# Altium footprint library PcbLib1.PcbLib: 37 footprints (part 1 of 3)
Each footprint in its own frame and in the unit in brackets; x right, y up, seen from the top. Pads: shape width x height; smd on the part's side, far side on the other; paste and mask are expansions set on the pad; w line width, h text height; cw(c..) or ccw(c..) is an arc to the next point about the centre after c.
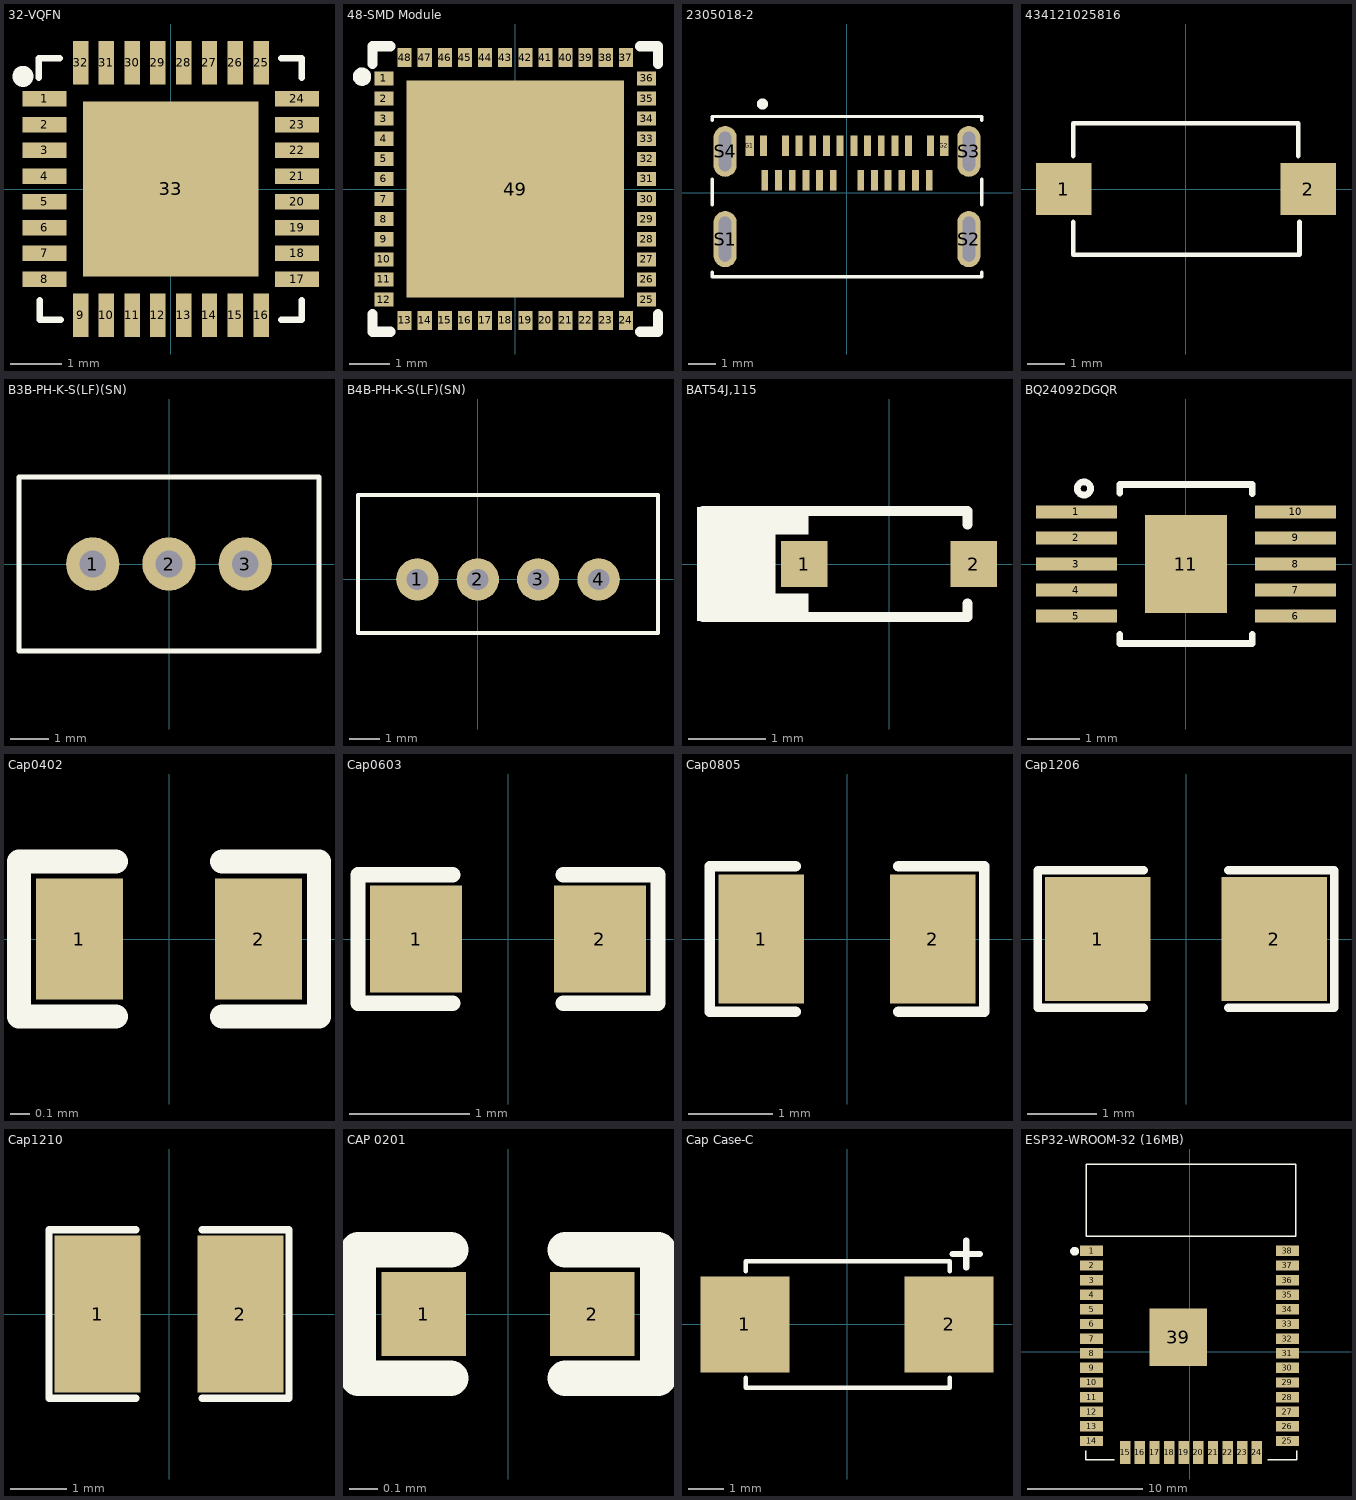
[diagram p0: the footprints below, top view; thin cyan lines are the x and y axes]

## 32-VQFN [mm] "IC MCU 8BIT 32KB FLASH 32VFQFN"
pads (33):
  rect 0.85x0.3 smd: 1(-2.45,1.75) 2(-2.45,1.25) 3(-2.45,0.75) 4(-2.45,0.25) 5(-2.45,-0.25) 6(-2.45,-0.75) 7(-2.45,-1.25) 8(-2.45,-1.75) 17(2.45,-1.75) 18(2.45,-1.25) 19(2.45,-0.75) 20(2.45,-0.25) 21(2.45,0.25) 22(2.45,0.75) 23(2.45,1.25) 24(2.45,1.75)
  rect 0.3x0.85 smd: 9(-1.75,-2.45) 10(-1.25,-2.45) 11(-0.75,-2.45) 12(-0.25,-2.45) 13(0.25,-2.45) 14(0.75,-2.45) 15(1.25,-2.45) 16(1.75,-2.45) 25(1.75,2.45) 26(1.25,2.45) 27(0.75,2.45) 28(0.25,2.45) 29(-0.25,2.45) 30(-0.75,2.45) 31(-1.25,2.45) 32(-1.75,2.45)
  rect 3.4x3.4 smd: 33(0,0)
Top Overlay:
  circle w0.254: c-2.87,2.184 r0.076
  lines w0.127: -2.561,2.159 -2.561,2.54 -2.159,2.54 ; -2.54,-2.159 -2.54,-2.54 -2.138,-2.54 ; 2.138,-2.54 2.54,-2.54 2.54,-2.159 ; 2.138,2.54 2.54,2.54 2.54,2.159
3D body "32M1-A_MCH.step": height 1.4, standoff 0, extent -2.55,-2.55 2.55,2.55

## 48-SMD Module [mm]
pads (49):
  rect 0.47x0.35 smd: 1(-3.265,2.75) 2(-3.265,2.25) 3(-3.265,1.75) 4(-3.265,1.25) 5(-3.265,0.75) 6(-3.265,0.25) 7(-3.265,-0.25) 8(-3.265,-0.75) 9(-3.265,-1.25) 10(-3.265,-1.75) 11(-3.265,-2.25) 12(-3.265,-2.75) 25(3.265,-2.75) 26(3.265,-2.25) 27(3.265,-1.75) 28(3.265,-1.25) 29(3.265,-0.75) 30(3.265,-0.25) 31(3.265,0.25) 32(3.265,0.75) 33(3.265,1.25) 34(3.265,1.75) 35(3.265,2.25) 36(3.265,2.75)
  rect 0.35x0.47 smd: 13(-2.75,-3.265) 14(-2.25,-3.265) 15(-1.75,-3.265) 16(-1.25,-3.265) 17(-0.75,-3.265) 18(-0.25,-3.265) 19(0.25,-3.265) 20(0.75,-3.265) 21(1.25,-3.265) 22(1.75,-3.265) 23(2.25,-3.265) 24(2.75,-3.265) 37(2.75,3.265) 38(2.25,3.265) 39(1.75,3.265) 40(1.25,3.265) 41(0.75,3.265) 42(0.25,3.265) 43(-0.25,3.265) 44(-0.75,3.265) 45(-1.25,3.265) 46(-1.75,3.265) 47(-2.25,3.265) 48(-2.75,3.265)
  rect 5.4x5.4 smd paste-4: 49(0,0)
Top Overlay:
  circle w0.254: c-3.81,2.794 r0.1
  lines w0.254: -3.55,-3.11 -3.55,-3.55 -3.11,-3.55 ; -3.55,3.11 -3.55,3.55 -3.11,3.55 ; 3.11,-3.55 3.55,-3.55 3.55,-3.11 ; 3.11,3.55 3.55,3.55 3.55,3.11
3D body "ESP32-PICO-D4--3DModel-STEP-56544.STEP": height 1.04, standoff 0, extent -3.5,-3.5 3.5,3.5

## 2305018-2 [mm] "CONN RCP USB3.1 TYPEC 24P SMD RA"
pads (30):
  rect 0.25x0.75 smd: A1(-3.05,1.7) A2(-2.25,1.7) A3(-1.75,1.7) A4(-1.25,1.7) A5(-0.75,1.7) A6(-0.25,1.7) A7(0.25,1.7) A8(0.75,1.7) A9(1.25,1.7) A10(1.75,1.7) A11(2.25,1.7) A12(3.05,1.7) B1(3,0.45) B2(2.5,0.45) B3(2,0.45) B4(1.5,0.45) B5(1,0.45) B6(0.5,0.45) B7(-0.5,0.45) B8(-1,0.45) B9(-1.5,0.45) B10(-2,0.45) B11(-2.5,0.45) B12(-3,0.45)
  rect 0.3x0.75 smd: G1(-3.55,1.7) G2(3.55,1.7)
  oval 0.85x2.05 hole 0.45 slot 1.65 at 90 deg: S1(-4.45,-1.7) S2(4.45,-1.7)
  oval 0.85x1.85 hole 0.45 slot 1.45 at 90 deg: S3(4.45,1.5) S4(-4.45,1.5)
Top Overlay:
  circle w0.2: c-3.085,3.232 r0.1
  lines w0.127: -4.925,-2.906 -4.925,-3.075 4.925,-3.075 4.925,-2.906 ; -4.925,-0.444 -4.925,0.48 ; -4.925,2.634 -4.925,2.775 4.925,2.775 4.925,2.634 ; 4.925,-0.444 4.925,0.48
Mechanical 13:
  lines w0.127: -4.925,2.775 4.925,2.775
3D body "2305018-2--3DModel-STEP-56544.STEP": height 3.53, standoff -0.53, extent -4.919,-5.856 4.919,2.794

## 434121025816 [mm] "SWITCH TACTILE SPST-NO 0.05A 12V"
pads (2):
  rect 1.5x1.4 smd: 1(-3.3,0) 2(3.3,0)
Top Overlay:
  lines w0.127: -3.048,-0.889 -3.048,-1.778 3.066,-1.778 3.066,-0.889 ; -3.048,0.889 -3.048,1.778 3.033,1.778 3.033,0.889
3D body "434121025816_Download_STP_434121025816_rev1.stp": height 2.5, standoff 0, extent -3.65,-1.95 3.65,1.95

## B3B-PH-K-S(LF)(SN) [mm] "CONN HEADER VERT 3POS 2MM"
pads (3):
  round 1.4 hole 0.7: 1(-2,0) 2(0,0) 3(2,0)
Top Overlay:
  lines w0.127: -3.937,-2.286 3.937,-2.286 3.937,2.286 -3.937,2.286 -3.937,-2.286
3D body "User Library-B3B-PH-K-S(LF)(SN).STEP": height 6, standoff -3.4, extent -3.95,-2.25 3.95,2.25

## B4B-PH-K-S(LF)(SN) [mm]
pads (4):
  round 1.4 hole 0.7: 1(-2,0) 2(0,0) 3(2,0) 4(4,0)
Top Overlay:
  lines w0.127: -3.962,-1.778 -3.962,2.794 5.962,2.794 5.962,-1.778 -3.962,-1.778
3D body "B4B-PH-K-S(LF)(SN)--3DModel-STEP-56544.STEP": height 6, standoff -3.4, extent -3.94,-1.716 5.96,2.784

## BAT54J,115 [mm] "DIODE SCHOTTKY 30V 200MA SOD323F"
pads (2):
  rect 0.6x0.6 smd: 1(-1.1,0) 2(1.1,0)
Top Overlay:
  rectangle: -1.626,0.381 -1.041,0.635
  rectangle: -2.489,-0.737 -1.473,0.737
  rectangle: -1.626,-0.635 -1.041,-0.381
  lines w0.127: -2.413,-0.686 1.016,-0.686 1.016,-0.508 ; -2.413,0.686 1.016,0.686 1.016,0.508
3D body "SOD323F_SC-90_NEX.step": height 0.82, standoff 0, extent -1.346,-0.673 1.346,0.673

## BQ24092DGQR [mm] "IC BATT CHG LI-ION 1CELL 10MSOP"
pads (11):
  rect 1.55x0.25 smd: 1(-2.1,1) 2(-2.1,0.5) 3(-2.1,0) 4(-2.1,-0.5) 5(-2.1,-1) 6(2.1,-1) 7(2.1,-0.5) 8(2.1,0) 9(2.1,0.5) 10(2.1,1)
  rect 1.57x1.88 smd: 11(0,0)
Top Overlay:
  circle w0.127: c-1.956,1.448 r0.127
  lines w0.127: -1.27,-1.348 -1.27,-1.524 1.27,-1.524 1.27,-1.349 ; -1.27,1.355 -1.27,1.524 1.27,1.524 1.27,1.35
3D body "BQ24092DGQR.STEP": height 1.1, standoff 0, extent -2.45,-1.5 2.45,1.5

## Cap0402 [mil]
pads (2):
  rect 18x25 smd mask+2.36: 1(-18.5,0) 2(18.5,0)
Top Overlay:
  lines w5: -11,-16 -31,-16 -31,16 -11,16 ; 11,-16 31,-16 31,16 11,16
3D body "User Library-Capacitor 0402.step": height 18.5, standoff -1.18, extent -19.68,-9.84 19.7,9.85

## Cap0603 [mil]
pads (2):
  rect 30x35 smd mask+2.36: 1(-30,0) 2(30,0)
Top Overlay:
  lines w5: -18,-21 -49,-21 -49,21 -18,21 ; 18,-21 49,-21 49,21 18,21
3D body "User Library-CAPC1608X09.step": height 34.25, standoff -1.18, extent -31.51,-15.75 31.49,15.74

## Cap0805 [mil] "SMD 0805"
pads (2):
  rect 40x60 smd mask+2.76: 1(-40,0) 2(40,0)
Top Overlay:
  lines w5: -24,-34 -64,-34 -64,34 -24,34 ; 24,-34 64,-34 64,34 24,34
3D body "User Library-0805 SMD Capacitor.step": height 30, standoff -0.79, extent -39.36,-24.6 39.38,24.61

## Cap1206 [mil] "SMD 1206"
pads (2):
  rect 60x70 smd: 1(-50,0) 2(50,0)
Top Overlay:
  lines w5: -24,-39 -84,-39 -84,39 -24,39 ; 24,-39 84,-39 84,39 24,39
3D body "User Library-1206 SMD Capacitor.step": height 39.45, standoff 0, extent -62.96,-31.46 63.03,31.53

## Cap1210 [mil] "SMD 1210"
pads (2):
  rect 60x110 smd: 1(-50,0) 2(50,0)
Top Overlay:
  lines w5: -23,-59 -84,-59 -84,59 -23,59 ; 23,-59 84,-59 84,59 23,59
3D body "User Library-CAPC3225X10.step": height 39.37, standoff 0, extent -62.99,-49.21 63,49.22

## CAP 0201 [mm]
pads (2):
  rect 0.3x0.3 smd mask+0.055: 1(-0.3,0) 2(0.3,0)
Top Overlay:
  lines w0.127: -0.203,-0.229 -0.533,-0.229 -0.533,0.229 -0.203,0.229 ; 0.203,-0.229 0.533,-0.229 0.533,0.229 0.203,0.229
3D body "User Library-SMD Ceramic Capacitors_0201 (0603)_AB.STEP": height 0.28, standoff -0.02, extent -0.3,-0.15 0.301,0.15

## Cap Case-C [mm] "Case-C"
pads (2):
  rect 2.5x2.7 smd: 1(-2.87,0) 2(2.87,0)
Top Overlay:
  lines w0.127: -2.845,-1.499 -2.845,-1.778 2.896,-1.778 2.896,-1.499 ; -2.845,1.499 -2.845,1.778 2.896,1.778 2.896,1.499
  lines w0.178: 2.972,1.981 3.734,1.981 ; 3.353,1.6 3.353,2.362
3D body "User Library-CAP_TANT_6032-28_y.step": height 2.8, standoff 0, extent -3.15,-1.75 3.15,1.75

## ESP32-WROOM-32 (16MB) [mm]
pads (39):
  rect 2x0.9 smd: 1(-8.5,8.755) 2(-8.5,7.485) 3(-8.5,6.215) 4(-8.5,4.945) 5(-8.5,3.675) 6(-8.5,2.405) 7(-8.5,1.135) 8(-8.5,-0.135) 9(-8.5,-1.405) 10(-8.5,-2.675) 11(-8.5,-3.945) 12(-8.5,-5.215) 13(-8.5,-6.485) 14(-8.5,-7.755) 25(8.5,-7.755) 26(8.5,-6.485) 27(8.5,-5.215) 28(8.5,-3.945) 29(8.5,-2.675) 30(8.5,-1.405) 31(8.5,-0.135) 32(8.5,1.135) 33(8.5,2.405) 34(8.5,3.675) 35(8.5,4.945) 36(8.5,6.215) 37(8.5,7.485) 38(8.5,8.755)
  rect 0.9x2 smd: 15(-5.58,-8.755) 16(-4.31,-8.755) 17(-3.04,-8.755) 18(-1.77,-8.755) 19(-0.5,-8.755) 20(0.77,-8.755) 21(2.04,-8.755) 22(3.31,-8.755) 23(4.58,-8.755) 24(5.85,-8.755)
  rect 5x5 smd: 39(-0.991,1.27)
Top Overlay:
  circle w0.5: c-9.978,8.725 r0.132
  lines w0.127: -9.017,-8.585 -9.017,-9.398 -6.528,-9.398 ; -8.957,10.025 9.215,10.025 9.215,16.299 -8.957,16.299 -8.957,10.033 ; 6.807,-9.398 9.296,-9.398 9.296,-8.585
3D body "User Library-esp-wroom-32.step": height 3.01, standoff -0.03, extent -8.908,-9.296 9.162,16.244